# Altium footprint library Aquarium_ATO_Footprints_V1_1.PcbLib: 18 footprints (part 1 of 2)
Each footprint in its own frame and in the unit in brackets; x right, y up, seen from the top. Pads: shape width x height; smd on the part's side, far side on the other; paste and mask are expansions set on the pad; w line width, h text height; cw(c..) or ccw(c..) is an arc to the next point about the centre after c.
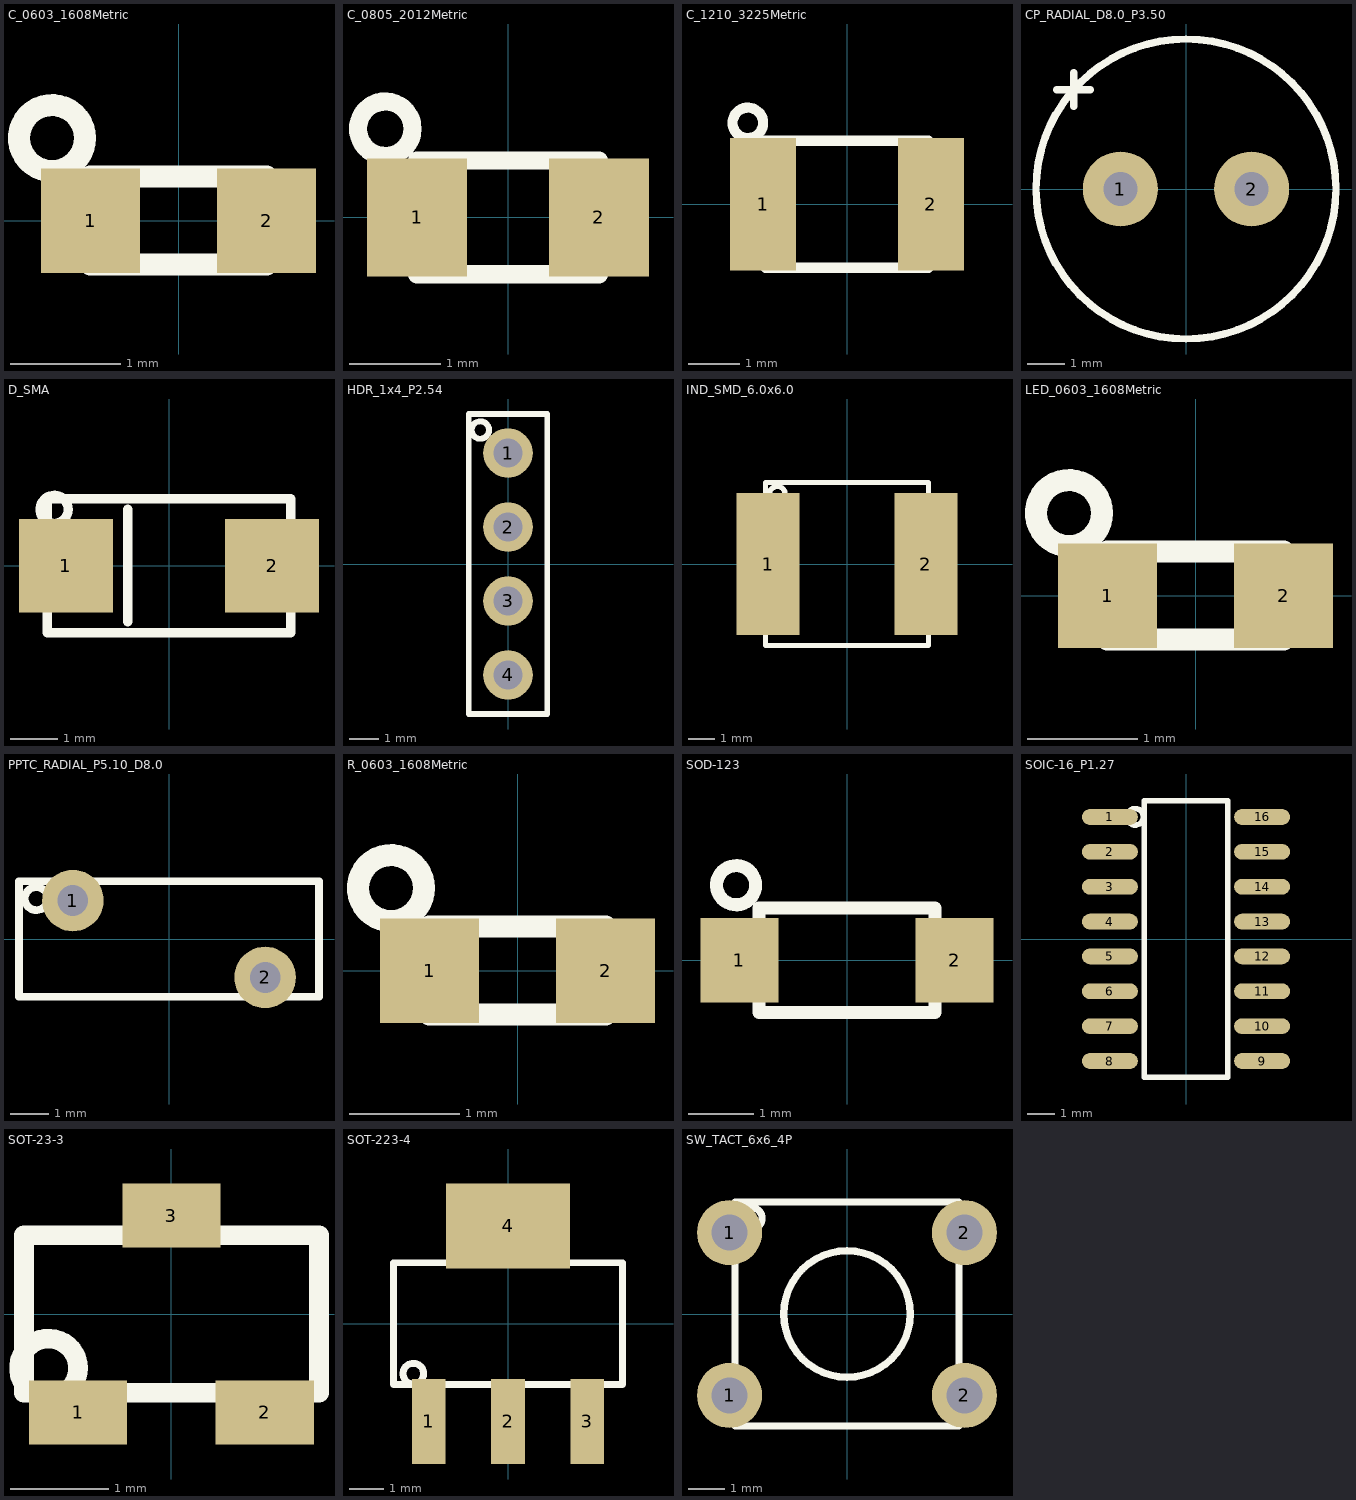
[diagram p0: the footprints below, top view; thin cyan lines are the x and y axes]

## C_0603_1608Metric [mm]
pads (2):
  rect 0.9x0.95 smd: 1(-0.8,0) 2(0.8,0)
Top Overlay:
  circle w0.2: c-1.15,0.75 r0.3
  lines w0.2: -0.8,-0.4 -0.8,0.4 0.8,0.4 0.8,-0.4 -0.8,-0.4

## C_0805_2012Metric [mm]
pads (2):
  rect 1.1x1.3 smd: 1(-1,0) 2(1,0)
Top Overlay:
  circle w0.2: c-1.35,0.975 r0.3
  lines w0.2: -1,-0.625 -1,0.625 1,0.625 1,-0.625 -1,-0.625

## C_1210_3225Metric [mm]
pads (2):
  rect 1.3x2.6 smd: 1(-1.65,0) 2(1.65,0)
Top Overlay:
  circle w0.2: c-1.95,1.6 r0.3
  lines w0.2: -1.6,-1.25 -1.6,1.25 1.6,1.25 1.6,-1.25 -1.6,-1.25

## CP_RADIAL_D8.0_P3.50 [mm]
pads (2):
  round 2 hole 0.9: 1(-1.75,0) 2(1.75,0)
Top Overlay:
  circle w0.2: c0,0 r4
  lines w0.2: -3.45,2.65 -2.55,2.65 ; -3,2.2 -3,3.1

## D_SMA [mm]
pads (2):
  rect 2x2 smd: 1(-2.2,0) 2(2.2,0)
Top Overlay:
  circle w0.2: c-2.45,1.2 r0.3
  lines w0.2: -0.88,-1.2 -0.88,1.2 ; -2.6,-1.43 -2.6,1.43 2.6,1.43 2.6,-1.43 -2.6,-1.43

## HDR_1x4_P2.54 [mm]
pads (4):
  round 1.7 hole 1: 1(0,3.81) 2(0,1.27) 3(0,-1.27) 4(0,-3.81)
Top Overlay:
  circle w0.2: c-0.95,4.6 r0.3
  lines w0.2: -1.35,-5.15 -1.35,5.15 1.35,5.15 1.35,-5.15 -1.35,-5.15

## IND_SMD_6.0x6.0 [mm]
pads (2):
  rect 2.4x5.4 smd: 1(-3,0) 2(3,0)
Top Overlay:
  circle w0.2: c-2.65,2.65 r0.3
  lines w0.2: -3.1,-3.1 -3.1,3.1 3.1,3.1 3.1,-3.1 -3.1,-3.1

## LED_0603_1608Metric [mm]
pads (2):
  rect 0.9x0.95 smd: 1(-0.8,0) 2(0.8,0)
Top Overlay:
  circle w0.2: c-1.15,0.75 r0.3
  lines w0.2: -0.8,-0.4 -0.8,0.4 0.8,0.4 0.8,-0.4 -0.8,-0.4

## PPTC_RADIAL_P5.10_D8.0 [mm]
pads (2):
  round 1.6 hole 0.8: 1(-2.5,1) 2(2.5,-1)
Top Overlay:
  circle w0.2: c-3.45,1.05 r0.3
  lines w0.2: -3.9,-1.5 -3.9,1.5 3.9,1.5 3.9,-1.5 -3.9,-1.5

## R_0603_1608Metric [mm]
pads (2):
  rect 0.9x0.95 smd: 1(-0.8,0) 2(0.8,0)
Top Overlay:
  circle w0.2: c-1.15,0.75 r0.3
  lines w0.2: -0.8,-0.4 -0.8,0.4 0.8,0.4 0.8,-0.4 -0.8,-0.4

## SOD-123 [mm]
pads (2):
  rect 1.2x1.3 smd: 1(-1.65,0) 2(1.65,0)
Top Overlay:
  circle w0.2: c-1.7,1.15 r0.3
  lines w0.2: -1.35,-0.8 -1.35,0.8 1.35,0.8 1.35,-0.8 -1.35,-0.8

## SOIC-16_P1.27 [mm]
pads (16):
  oval 2.04x0.57 smd: 1(-2.77,4.445) 2(-2.77,3.175) 3(-2.77,1.905) 4(-2.77,0.635) 5(-2.77,-0.635) 6(-2.77,-1.905) 7(-2.77,-3.175) 8(-2.77,-4.445) 9(2.77,-4.445) 10(2.77,-3.175) 11(2.77,-1.905) 12(2.77,-0.635) 13(2.77,0.635) 14(2.77,1.905) 15(2.77,3.175) 16(2.77,4.445)
Top Overlay:
  circle w0.2: c-1.85,4.45 r0.3
  lines w0.2: -1.52,-5.03 -1.52,5.03 1.52,5.03 1.52,-5.03 -1.52,-5.03

## SOT-23-3 [mm]
pads (3):
  rect 1x0.65 smd: 1(-0.95,-1) 2(0.95,-1) 3(0,1)
Top Overlay:
  circle w0.2: c-1.25,-0.55 r0.3
  lines w0.2: -1.5,-0.8 -1.5,0.8 1.5,0.8 1.5,-0.8 -1.5,-0.8

## SOT-223-4 [mm]
pads (4):
  rect 0.98x2.47 smd: 1(-2.3,-2.84) 2(0,-2.84) 3(2.3,-2.84)
  rect 3.6x2.47 smd: 4(0,2.84)
Top Overlay:
  circle w0.2: c-2.75,-1.45 r0.3
  lines w0.2: -3.33,-1.77 -3.33,1.77 3.33,1.77 3.33,-1.77 -3.33,-1.77

## SW_TACT_6x6_4P [mm]
pads (4):
  round 1.8 hole 1: 1(-3.25,-2.25) 1(-3.25,2.25) 2(3.25,-2.25) 2(3.25,2.25)
Top Overlay:
  circle w0.2: c-2.65,2.65 r0.3
  circle w0.2: c0,0 r1.75
  lines w0.2: -3.1,-3.1 -3.1,3.1 3.1,3.1 3.1,-3.1 -3.1,-3.1

## TB_2P_P5.08 [mm]